# Altium footprint library BAT5404E6327HTSA1.PcbLib: 3 footprints
Each footprint in its own frame and in the unit in brackets; x right, y up, seen from the top. Pads: shape width x height; smd on the part's side, far side on the other; paste and mask are expansions set on the pad; w line width, h text height; cw(c..) or ccw(c..) is an arc to the next point about the centre after c.
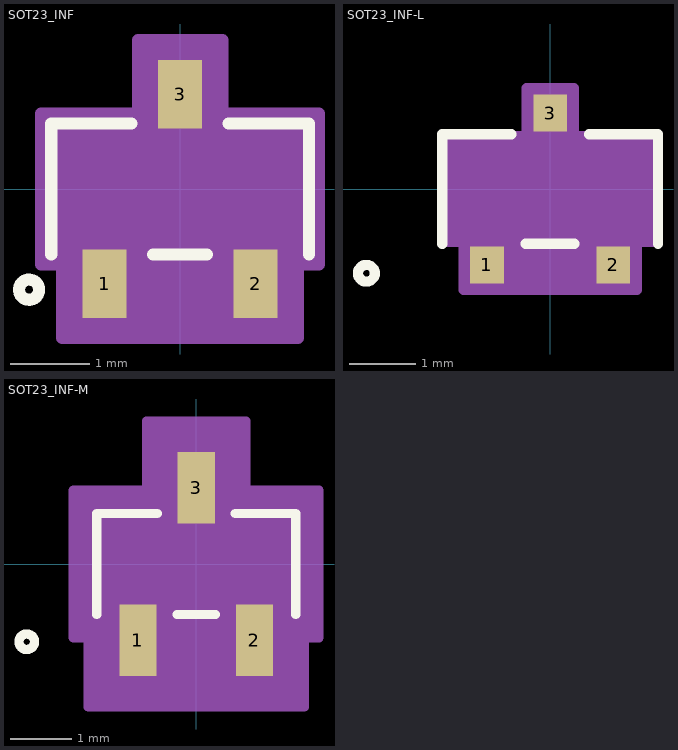
[diagram p0: the footprints below, top view; thin cyan lines are the x and y axes]

## SOT23_INF [mil]
pads (3):
  rect 22x34 smd paste+0 mask+0: 1(-37.5,-47) 2(37.5,-47) 3(0,47)
Top Overlay:
  circle w6: c-75,-50 r5
  lines w6: -64,-32.5 -64,32.5 -24.1,32.5 ; -13.4,-32.5 13.4,-32.5 ; 24.1,32.5 64,32.5 64,-32.5
Mechanical 13:
  circle w1: c-49,-17.5 r5
  lines w1: -59,-27.5 59,-27.5 59,27.5 -59,27.5 -59,-27.5 ; -47.5,-50 -47.5,-27.5 -27.5,-27.5 -27.5,-50 -47.5,-50 ; -10,27.5 10,27.5 10,50 -10,50 -10,27.5 ; 27.5,-50 27.5,-27.5 47.5,-27.5 47.5,-50 27.5,-50
Mechanical 15:
  region: -69,-37.5 -69,37.5 -21,37.5 -21,74 21,74 21,37.5 69,37.5 69,-37.5 58.5,-37.5 58.5,-74 -58.5,-74 -58.5,-37.5
  region: 59,-27.5 -59,-27.5 -59,27.5 59,27.5
  lines w6: -69,-37.5 -69,37.5 -21,37.5 -21,74 21,74 21,37.5 69,37.5 69,-37.5 58.5,-37.5 58.5,-74 -58.5,-74 -58.5,-37.5 -69,-37.5
3D body "SOT23_INF.step": height 43.11, standoff 0, extent -59.02,-50 59.02,50

## SOT23_INF-L [mil]
pads (3):
  rect 20x22 smd paste+0 mask+0: 1(-37.5,-45) 2(37.5,-45) 3(0,45)
Top Overlay:
  circle w6: c-109,-50 r5
  lines w6: -64,-32.5 -64,32.5 -23.01,32.5 ; -14.49,-32.5 14.49,-32.5 ; 23.01,32.5 64,32.5 64,-32.5
  text ".Designator" at -137.5,-25 h50
Mechanical 13:
  circle w1: c-49,-17.5 r5
  lines w1: -59,-27.5 59,-27.5 59,27.5 -59,27.5 -59,-27.5 ; -47.5,-50 -47.5,-27.5 -27.5,-27.5 -27.5,-50 -47.5,-50 ; -10,27.5 10,27.5 10,50 -10,50 -10,27.5 ; 27.5,-50 27.5,-27.5 47.5,-27.5 47.5,-50 27.5,-50
  text ".Designator" at -137.5,-25 h50
Mechanical 15:
  region: -63,-31.5 -63,31.5 -14,31.5 -14,60 14,60 14,31.5 63,31.5 63,-31.5 51.5,-31.5 51.5,-60 -51.5,-60 -51.5,-31.5
  region: 59,-27.5 -59,-27.5 -59,27.5 59,27.5
  lines w6: -63,-31.5 -63,31.5 -14,31.5 -14,60 14,60 14,31.5 63,31.5 63,-31.5 51.5,-31.5 51.5,-60 -51.5,-60 -51.5,-31.5 -63,-31.5
3D body "SOT23_INF.step": height 43.11, standoff 0, extent -59.02,-50 59.02,50

## SOT23_INF-M [mil]
pads (3):
  rect 24x46 smd paste+0 mask+0: 1(-37.5,-49) 2(37.5,-49) 3(0,49)
Top Overlay:
  circle w6: c-109,-50 r5
  lines w6: -64,-32.5 -64,32.5 -25.1,32.5 ; -12.4,-32.5 12.4,-32.5 ; 25.1,32.5 64,32.5 64,-32.5
  text ".Designator" at -137.5,-25 h50
Mechanical 13:
  circle w1: c-49,-17.5 r5
  lines w1: -59,-27.5 59,-27.5 59,27.5 -59,27.5 -59,-27.5 ; -47.5,-50 -47.5,-27.5 -27.5,-27.5 -27.5,-50 -47.5,-50 ; -10,27.5 10,27.5 10,50 -10,50 -10,27.5 ; 27.5,-50 27.5,-27.5 47.5,-27.5 47.5,-50 27.5,-50
  text ".Designator" at -137.5,-25 h50
Mechanical 15:
  region: -79,-47.5 -79,47.5 -32,47.5 -32,92 32,92 32,47.5 79,47.5 79,-47.5 69.5,-47.5 69.5,-92 -69.5,-92 -69.5,-47.5
  region: 59,-27.5 -59,-27.5 -59,27.5 59,27.5
  lines w6: -79,-47.5 -79,47.5 -32,47.5 -32,92 32,92 32,47.5 79,47.5 79,-47.5 69.5,-47.5 69.5,-92 -69.5,-92 -69.5,-47.5 -79,-47.5
3D body "SOT23_INF.step": height 43.11, standoff 0, extent -59.02,-50 59.02,50